# Altium schematic symbol library Capacitor.SchLib: 735 symbols (part 19 of 20)
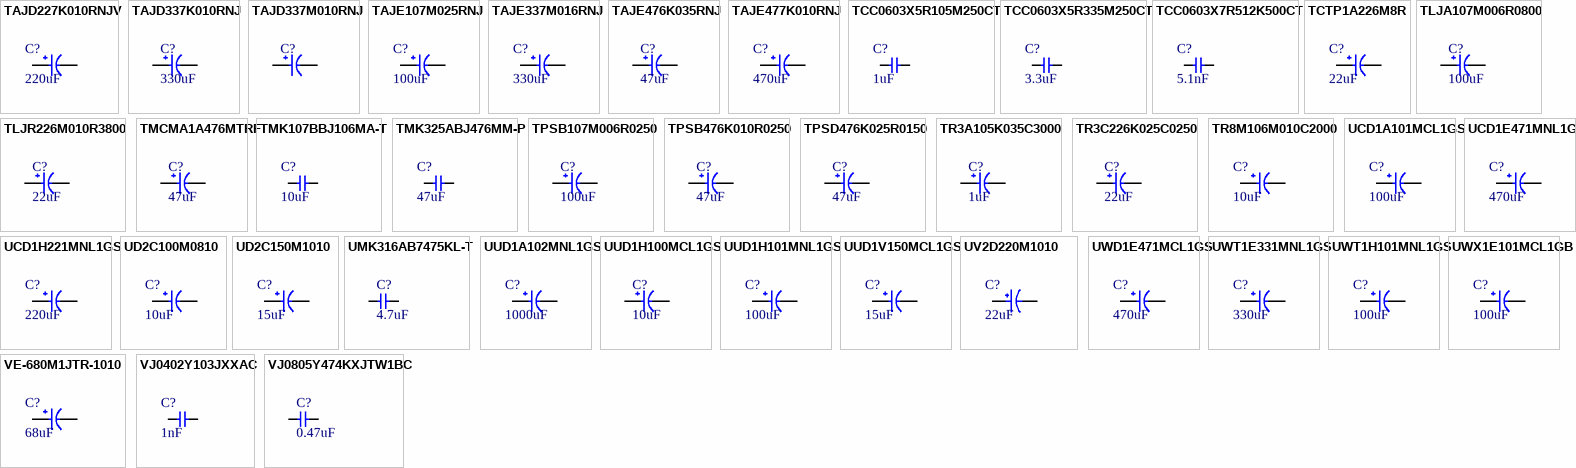
[diagram p36: symbols TAJD227K010RNJV to VJ0805Y474KXJTW1BC]

## TAJD337K010RNJ
designator C?, comment 330uF
CAP TANT 330UF 10% 10V 2917; Manufacturer: Kyocera AVX; Manufacturer Part Number: TAJD337K010RNJ; Item Type: Capacitor; Dielectric Material: 5684ConductorMaterial; Life (Hours): 1000Hour; Ripple Current: 408mA; Supplier: Avnet; LCSC Part Number: C7226; RoHS: Yes; Stock: 24500; Pricing: 500=0.37263 (USD); Voltage Rating (AC): 10V; Lead Free: 5697LeadFree; ComponentLink1URL: https://datasheet.ciiva.com/11794/0900766b802e69d0-11794408.pdf?src-supplier=Rs; ComponentLink1Description: https://datasheet.ciiva.com/11794/0900766b802e69d0-11794408.pdf?src-supplier=Rs; ComponentLink2URL: https://datasheet.ciiva.com/19467/1236841-19467295.pdf?src-supplier=Jameco; ComponentLink2Description: https://datasheet.ciiva.com/19467/1236841-19467295.pdf?src-supplier=Jameco; ComponentLink3URL: https://datasheet.ciiva.com/26944/getdatasheetpartid-149137-26944845.pdf?src-supplier=Verical; ComponentLink3Description: https://datasheet.ciiva.com/26944/getdatasheetpartid-149137-26944845.pdf?src-supplier=Verical; ComponentLink4URL: https://datasheet.ciiva.com/3004/taj-3004541.pdf?src-supplier=Avnet; ComponentLink4Description: https://datasheet.ciiva.com/3004/taj-3004541.pdf?src-supplier=Avnet; ComponentLink5URL: https://datasheet.ciiva.com/3004/taj-3004542.pdf?src-supplier=Avnet; ComponentLink5Description: https://datasheet.ciiva.com/3004/taj-3004542.pdf?src-supplier=Avnet; ComponentLink6URL: https://datasheet.ciiva.com/265/taj-265298.pdf?src-supplier=Digikey; ComponentLink6Description: https://datasheet.ciiva.com/265/taj-265298.pdf?src-supplier=Digikey; ComponentLink7URL: https://datasheet.ciiva.com/265/taj-265299.pdf?src-supplier=Digikey; ComponentLink7Description: https://datasheet.ciiva.com/265/taj-265299.pdf?src-supplier=Digikey; ComponentLink8URL: https://datasheet.ciiva.com/265/taj-265300.pdf?src-supplier=Digikey; ComponentLink8Description: https://datasheet.ciiva.com/265/taj-265300.pdf?src-supplier=Digikey; ComponentLink9URL: https://datasheet.ciiva.com/7832/1680476-7832489.pdf?src-supplier=Element14; ComponentLink9Description: https://datasheet.ciiva.com/7832/1680476-7832489.pdf?src-supplier=Element14; ComponentLink10URL: https://datasheet.ciiva.com/7832/1680476-7832490.pdf?src-supplier=Element14; ComponentLink10Description: https://datasheet.ciiva.com/7832/1680476-7832490.pdf?src-supplier=Element14; ComponentLink11URL: https://datasheet.ciiva.com/7832/1680476-7832491.pdf?src-supplier=Element14; ComponentLink11Description: https://datasheet.ciiva.com/7832/1680476-7832491.pdf?src-supplier=Element14
footprint Case-D
pins: 1, 2

## TAJD337M010RNJ
designator C?
CAP TANT 330UF 20% 10V 2917; Manufacturer: Kyocera AVX; Manufacturer Part Number: TAJD337M010RNJ; Item Type: Capacitor; Supplier: Avnet; LCSC Part Number: C105408; RoHS: Yes; Stock: 500; Pricing: 500=0.71669, 1000=0.70459, 2000=0.6925, 3000=0.6804, 4000=0.6683 (USD); ComponentLink1URL: https://datasheet.ciiva.com/28563/1719052-28563980.pdf?src-supplier=Element14; ComponentLink1Description: https://datasheet.ciiva.com/28563/1719052-28563980.pdf?src-supplier=Element14; ComponentLink2URL: https://datasheet.ciiva.com/22667/1719052-22667623.pdf?src-supplier=Element14; ComponentLink2Description: https://datasheet.ciiva.com/22667/1719052-22667623.pdf?src-supplier=Element14; ComponentLink3URL: https://datasheet.ciiva.com/26822/getdatasheetpartid-86508-26822390.pdf?src-supplier=Verical; ComponentLink3Description: https://datasheet.ciiva.com/26822/getdatasheetpartid-86508-26822390.pdf?src-supplier=Verical; ComponentLink4URL: https://datasheet.ciiva.com/16334/taj-16334699.pdf?src-supplier=Future+Electronics; ComponentLink4Description: https://datasheet.ciiva.com/16334/taj-16334699.pdf?src-supplier=Future+Electronics; ComponentLink5URL: https://datasheet.ciiva.com/265/taj-265249.pdf?src-supplier=Digikey; ComponentLink5Description: https://datasheet.ciiva.com/265/taj-265249.pdf?src-supplier=Digikey; ComponentLink6URL: https://datasheet.ciiva.com/265/taj-265250.pdf?src-supplier=Digikey; ComponentLink6Description: https://datasheet.ciiva.com/265/taj-265250.pdf?src-supplier=Digikey; ComponentLink7URL: https://datasheet.ciiva.com/265/taj-265251.pdf?src-supplier=Digikey; ComponentLink7Description: https://datasheet.ciiva.com/265/taj-265251.pdf?src-supplier=Digikey; ComponentLink8URL: https://datasheet.ciiva.com/11228/taj-11228552.pdf?src-supplier=Avnet; ComponentLink8Description: https://datasheet.ciiva.com/11228/taj-11228552.pdf?src-supplier=Avnet
footprint Case-D
pins: 1, 2

## TAJE107M025RNJ
designator C?, comment 100uF
CAP TANT 100UF 20% 25V 2917; Manufacturer: Kyocera AVX; Manufacturer Part Number: TAJE107M025RNJ; ESR (Equivalent Series Resistance): 300mR; Leakage Current: 25uA; Polarity: Polar; Dissipation Factor: 10%; Supplier 1: Mouser; RoHS: Yes; Category: Tantalum Capacitors; Stock 1: 109; Pricing 1: 1=2.81000, 10=2.81000, 50=2.81000, 100=2.19000, 1000=1.76000, 10000=1.76000 (USD); Mount: Surface Mount; Case/Package: 2917; Number of Pins: 2; Case Code (Imperial): 2917; Case Code (Metric): 7343; Min Operating Temperature: -55°C; Max Operating Temperature: 125°C; Capacitance: 100uF; Tolerance: 20%; Packaging: Tape and Reel; Voltage Rating: 25V; Voltage Rating (DC): 25V; Features: General Purpose; Package Quantity: 1; Termination: SMD/SMT; Series: TAJ; Construction: Flat; Length: 7.3mm; Width: 4.3mm; Height: 4.3mm; Depth: 4.3mm; Height - Seated (Max): 0.169inch; Radiation Hardening: No; Lead Free: Lead Free; RoHS Compliant: Yes; REACH SVHC: No SVHC; ComponentLink1URL: https://datasheet.ciiva.com/26787/taje107m025rnj-26787048.pdf?src-supplier=IIIC; ComponentLink1Description: https://datasheet.ciiva.com/26787/taje107m025rnj-26787048.pdf?src-supplier=IIIC; ComponentLink2URL: https://datasheet.ciiva.com/265/taj-265541.pdf?src-supplier=Digi-Key; ComponentLink2Description: https://datasheet.ciiva.com/265/taj-265541.pdf?src-supplier=Digi-Key; ComponentLink3URL: https://datasheet.ciiva.com/265/taj-265542.pdf?src-supplier=Digi-Key; ComponentLink3Description: https://datasheet.ciiva.com/265/taj-265542.pdf?src-supplier=Digi-Key; ComponentLink4URL: https://datasheet.ciiva.com/265/taj-265540.pdf?src-supplier=Digi-Key; ComponentLink4Description: https://datasheet.ciiva.com/265/taj-265540.pdf?src-supplier=Digi-Key; ComponentLink5URL: https://datasheet.ciiva.com/28609/1719052-28609254.pdf?src-supplier=Element14; ComponentLink5Description: https://datasheet.ciiva.com/28609/1719052-28609254.pdf?src-supplier=Element14; ComponentLink6URL: https://datasheet.ciiva.com/11230/taj-11230456.pdf?src-supplier=Avnet; ComponentLink6Description: https://datasheet.ciiva.com/11230/taj-11230456.pdf?src-supplier=Avnet; ComponentLink7URL: https://datasheet.ciiva.com/17339/taj-17339677.pdf?src-supplier=Avnet+Europe; ComponentLink7Description: https://datasheet.ciiva.com/17339/taj-17339677.pdf?src-supplier=Avnet+Europe; ComponentLink8URL: https://datasheet.ciiva.com/22667/1719052-22667581.pdf?src-supplier=Element14; ComponentLink8Description: https://datasheet.ciiva.com/22667/1719052-22667581.pdf?src-supplier=Element14; Supplier Part Number 1: 581-TAJE107M025RNJ; LCSC Part Number: C7230
footprint Case-E
pins: 1, 2

## TAJE337M016RNJ
designator C?, comment 330uF
CAP TANT 330UF 20% 16V 2917; Manufacturer: Kyocera AVX; Manufacturer Part Number: TAJE337M016RNJ; ESR (Equivalent Series Resistance): 400mR; Leakage Current: 52.8uA; Dissipation Factor: 30%; Item Type: Capacitor; Supplier 1: Arrow Electronics; RoHS: Yes; Category: Tantalum Capacitors; Stock 1: 4000; Pricing 1: 400=1.8678, 2000=1.7998, 4000=1.7657, 6000=1.7481, 10000=1.7306, 30000=1.7133, 50000=1.6961 (USD); Mounting Technology: Surface Mount; Case/Package: 2917; Case Code (Imperial): 2917; Case Code (Metric): 7343; Min Operating Temperature: -55°C; Max Operating Temperature: 125°C; Voltage Rating: 16V; Tolerance: 20%; Packaging: Tape and Reel; Value: 330uF; Termination: SMD/SMT; Voltage Rating (DC): 16V; Series: TAJ; Features: General Purpose; Length: 7.3mm; Width: 4.3mm; Height: 4.3mm; Lead Free: Lead Free; RoHS Compliant: Yes; ComponentLink1URL: https://datasheet.ciiva.com/12882/taj-27497-12882412.pdf?src-supplier=Mouser; ComponentLink1Description: https://datasheet.ciiva.com/12882/taj-27497-12882412.pdf?src-supplier=Mouser; Supplier Part Number 1: TAJE337M016RNJ; LCSC Part Number: C51599
footprint Case-E
pins: 1, 2

## TAJE476K035RNJ
designator C?, comment 47uF
CAP TANT 47UF 10% 35V 2917; Manufacturer: Kyocera AVX; Manufacturer Part Number: TAJE476K035RNJ; Item Type: Capacitors; Dielectric Material: Tantalum; ESR (Equivalent Series Resistance): 900mR; Leakage Current: 16.5uA; Polarity: Polar; Dissipation Factor: 6%; Life (Hours): 2000Hour; Ripple Current: 428mA; Supplier: Digikey; LCSC Part Number: C7233; RoHS: Yes; Stock: 9111; Pricing: 1=3.22, 10=2.115, 50=1.6684, 100=1.5289 (USD); Mounting Technology: Surface Mount,PCB; Case/Package: 2917; Case Code (Metric): 7343; Case Code (Imperial): 2917; Min Operating Temperature: -55°C; Max Operating Temperature: 125°C; Tolerance: 10%; Value: 47uF; Voltage Rating (DC): 35V; Voltage Rating: 35V; Package Quantity: 400; Packaging: Tape and Reel; Termination: SMD/SMT; Voltage: 35V; Features: General Purpose; Series: TAJ; Construction: Flat; Voltage Rating (AC): 35V; Length: 7.3mm; Width: 4.3mm; Height: 4.1mm; Depth: 4.3mm; Radiation Hardening: No; Lead Free: Lead Free; RoHS Compliant: Yes; Reach SVHC Compliant: No; ComponentLink1URL: https://datasheet.ciiva.com/11794/0900766b802e69d0-11794419.pdf?src-supplier=Rs; ComponentLink1Description: https://datasheet.ciiva.com/11794/0900766b802e69d0-11794419.pdf?src-supplier=Rs; ComponentLink2URL: https://datasheet.ciiva.com/18710/taj-eng-18710669.pdf?src-supplier=Distrelec; ComponentLink2Description: https://datasheet.ciiva.com/18710/taj-eng-18710669.pdf?src-supplier=Distrelec; ComponentLink3URL: https://datasheet.ciiva.com/7713/49917-7713350.pdf?src-supplier=Element14; ComponentLink3Description: https://datasheet.ciiva.com/7713/49917-7713350.pdf?src-supplier=Element14; ComponentLink4URL: https://datasheet.ciiva.com/7713/49917-7713351.pdf?src-supplier=Element14; ComponentLink4Description: https://datasheet.ciiva.com/7713/49917-7713351.pdf?src-supplier=Element14; ComponentLink5URL: https://datasheet.ciiva.com/7713/1680476-7713349.pdf?src-supplier=Element14; ComponentLink5Description: https://datasheet.ciiva.com/7713/1680476-7713349.pdf?src-supplier=Element14; ComponentLink6URL: https://datasheet.ciiva.com/265/taj-265571.pdf?src-supplier=Digikey; ComponentLink6Description: https://datasheet.ciiva.com/265/taj-265571.pdf?src-supplier=Digikey; ComponentLink7URL: https://datasheet.ciiva.com/265/taj-265570.pdf?src-supplier=Digikey; ComponentLink7Description: https://datasheet.ciiva.com/265/taj-265570.pdf?src-supplier=Digikey; ComponentLink8URL: https://datasheet.ciiva.com/265/taj-265572.pdf?src-supplier=Digikey; ComponentLink8Description: https://datasheet.ciiva.com/265/taj-265572.pdf?src-supplier=Digikey; ComponentLink9URL: https://datasheet.ciiva.com/12911/taj-27497-12911448.pdf?src-supplier=Mouser; ComponentLink9Description: https://datasheet.ciiva.com/12911/taj-27497-12911448.pdf?src-supplier=Mouser; ComponentLink10URL: https://datasheet.ciiva.com/14603/70001050-14603965.pdf?src-supplier=Allied+Electronics; ComponentLink10Description: https://datasheet.ciiva.com/14603/70001050-14603965.pdf?src-supplier=Allied+Electronics; ComponentLink11URL: https://datasheet.ciiva.com/3004/taj-3004568.pdf?src-supplier=Avnet; ComponentLink11Description: https://datasheet.ciiva.com/3004/taj-3004568.pdf?src-supplier=Avnet; ComponentLink12URL: https://datasheet.ciiva.com/16204/taj-16204972.pdf?src-supplier=Future+Electronics; ComponentLink12Description: https://datasheet.ciiva.com/16204/taj-16204972.pdf?src-supplier=Future+Electronics
footprint Case-E
pins: 1, 2

## TAJE477K010RNJ
designator C?, comment 470uF
CAP TANT 470UF 10% 10V 2917; Manufacturer: Kyocera AVX; Manufacturer Part Number: TAJE477K010RNJ; Dielectric Material: Tantalum; ESR (Equivalent Series Resistance): 500mR; Leakage Current: 47uA; Polarity: Polar; Item Type: Capacitor; Supplier 1: Arrow Electronics; RoHS: Yes; Category: Tantalum Capacitors; Stock 1: 5; Pricing 1: 1=1.3181 (USD); Mounting Technology: Surface Mount,PCB; Case/Package: 2917; Pins: 2; Case Code (Imperial): 2917; Case Code (Metric): 7343; Min Operating Temperature: -55°C; Max Operating Temperature: 125°C; Value: 470uF; Tolerance: 10%; Packaging: Tape and Reel; Voltage Rating: 10V; Voltage Rating (DC): 10V; Package Quantity: 400; Termination: SMD/SMT; Voltage: 10V; Dissipation Factor: 10%; Features: General Purpose; Series: TAJ; Construction: Flat; Length: 7.3mm; Width: 4.3mm; Height: 4.1mm; Depth: 4.3mm; Lead Pitch: 4.4mm; Radiation Hardening: No; Reach SVHC Compliant: No; Lead Free: Lead Free; RoHS Compliant: Yes; ComponentLink1URL: https://datasheet.ciiva.com/7832/taj-7832508.pdf?src-supplier=Element14; ComponentLink1Description: https://datasheet.ciiva.com/7832/taj-7832508.pdf?src-supplier=Element14; ComponentLink2URL: https://datasheet.ciiva.com/7832/taj-7832507.pdf?src-supplier=Element14; ComponentLink2Description: https://datasheet.ciiva.com/7832/taj-7832507.pdf?src-supplier=Element14; ComponentLink3URL: https://datasheet.ciiva.com/265/taj-265547.pdf?src-supplier=Digi-Key; ComponentLink3Description: https://datasheet.ciiva.com/265/taj-265547.pdf?src-supplier=Digi-Key; ComponentLink4URL: https://datasheet.ciiva.com/265/taj-265546.pdf?src-supplier=Digi-Key; ComponentLink4Description: https://datasheet.ciiva.com/265/taj-265546.pdf?src-supplier=Digi-Key; ComponentLink5URL: https://datasheet.ciiva.com/265/taj-265548.pdf?src-supplier=Digi-Key; ComponentLink5Description: https://datasheet.ciiva.com/265/taj-265548.pdf?src-supplier=Digi-Key; ComponentLink6URL: https://datasheet.ciiva.com/12882/taj-27497-12882504.pdf?src-supplier=Mouser; ComponentLink6Description: https://datasheet.ciiva.com/12882/taj-27497-12882504.pdf?src-supplier=Mouser; ComponentLink7URL: https://datasheet.ciiva.com/14602/70001050-14602312.pdf?src-supplier=Allied+Electronics; ComponentLink7Description: https://datasheet.ciiva.com/14602/70001050-14602312.pdf?src-supplier=Allied+Electronics; ComponentLink8URL: https://datasheet.ciiva.com/14600/70001050-14600301.pdf?src-supplier=Allied+Electronics; ComponentLink8Description: https://datasheet.ciiva.com/14600/70001050-14600301.pdf?src-supplier=Allied+Electronics; ComponentLink9URL: https://datasheet.ciiva.com/11229/taj-11229470.pdf?src-supplier=Avnet; ComponentLink9Description: https://datasheet.ciiva.com/11229/taj-11229470.pdf?src-supplier=Avnet; ComponentLink10URL: https://datasheet.ciiva.com/16330/taj-16330918.pdf?src-supplier=Future+Electronics; ComponentLink10Description: https://datasheet.ciiva.com/16330/taj-16330918.pdf?src-supplier=Future+Electronics; Supplier Part Number 1: TAJE477K010RNJ; LCSC Part Number: C7234
footprint Case-E
pins: 1, 2

## TCC0603X5R105M250CT
designator C?, comment 1uF
1uF 25V X5R ±20% 0603 Multilayer Ceramic Capacitors MLCC - SMD/SMT ROHS; Manufacturer: CCTC; Manufacturer Part Number: TCC0603X5R105M250CT; LCSC Part Number: C6266891; Value: 1uF; Item Type: Capacitor; ComponentLink1Description: LCSC; ComponentLink1URL: https://www.lcsc.com/product-detail/Multilayer-Ceramic-Capacitors-MLCC-SMD-SMT_CCTC-TCC0603X5R105M250CT_C6266891.html
footprint Cap-0603
pins: 1, 2

## TCC0603X5R335M250CT
designator C?, comment 3.3uF
25V 3.3uF X5R ±20% 0603 Multilayer Ceramic Capacitors MLCC - SMD/SMT ROHS; Manufacturer: CCTC; Manufacturer Part Number: TCC0603X5R335M250CT; Package: 0603; LCSC Part Number: C5360803; Item Type: Capacitor; ComponentLink1Description: LCSC; ComponentLink1URL: https://www.lcsc.com/product-detail/Multilayer-Ceramic-Capacitors-MLCC-SMD-SMT_CCTC-TCC0603X5R335M250CT_C5360803.html
footprint Cap-0603
pins: 1, 2

## TCC0603X7R512K500CT
designator C?, comment 5.1nF
5.1nF 50V X7R ±10% 0603 Multilayer Ceramic Capacitors MLCC - SMD/SMT ROHS; Manufacturer: CCTC; Manufacturer Part Number: TCC0603X7R512K500CT; Package: 0603; LCSC Part Number: C5360792; Item Type: Capacitor; ComponentLink1Description: LCSC; ComponentLink1URL: https://www.lcsc.com/product-detail/Multilayer-Ceramic-Capacitors-MLCC-SMD-SMT_CCTC-TCC0603X7R512K500CT_C5360792.html
footprint Cap-0603
pins: 1, 2

## TCTP1A226M8R
designator C?, comment 22uF
22uF 10V 5Ω ±20% 0805 Tantalum Capacitors ROHS; Manufacturer: Rohm; Manufacturer Part Number: TCTP1A226M8R; Package: 0805; LCSC Part Number: C2859526; Item Type: Capacitor; ComponentLink1Description: LCSC; ComponentLink1URL: https://www.lcsc.com/product-detail/Tantalum-Capacitors_ROHM-Semicon-TCTP1A226M8R_C2859526.html
footprint Tant-0805
pins: 1, 2

## TLJA107M006R0800
designator C?, comment 100uF
CAP TANT 100UF 20% 6.3V 1206; Manufacturer: Kyocera AVX; Manufacturer Part Number: TLJA107M006R0800; Item Type: Capacitors; Supplier: Arrow Electronics; LCSC Part Number: C27279; RoHS: Yes; Stock: 902000; Pricing: 2000=0.7824, 4000=0.7215, 6000=0.7147, 10000=0.7079, 20000=0.7011, 50000=0.6943 (USD); ComponentLink1URL: https://datasheet.ciiva.com/7720/tlj-7720678.pdf?src-supplier=Element14; ComponentLink1Description: https://datasheet.ciiva.com/7720/tlj-7720678.pdf?src-supplier=Element14; ComponentLink2URL: https://datasheet.ciiva.com/7720/tlj-7720679.pdf?src-supplier=Element14; ComponentLink2Description: https://datasheet.ciiva.com/7720/tlj-7720679.pdf?src-supplier=Element14; ComponentLink3URL: https://datasheet.ciiva.com/6237/tlj-6237900.pdf?src-supplier=Digikey; ComponentLink3Description: https://datasheet.ciiva.com/6237/tlj-6237900.pdf?src-supplier=Digikey; ComponentLink4URL: https://datasheet.ciiva.com/11227/tlj-11227211.pdf?src-supplier=Avnet; ComponentLink4Description: https://datasheet.ciiva.com/11227/tlj-11227211.pdf?src-supplier=Avnet
footprint Case-A
pins: 1, 2

## TLJR226M010R3800
designator C?, comment 22uF
CAP TANT 22UF 20% 10V 0805; Manufacturer: Kyocera AVX; Manufacturer Part Number: TLJR226M010R3800; Item Type: Capacitors; Supplier: Digikey; LCSC Part Number: C1954754; RoHS: Yes; Stock: 3333; Pricing: 1=0.78, 10=0.472, 50=0.3502, 100=0.3122, 500=0.24762, 1000=0.22743 (USD); ComponentLink1URL: https://datasheet.ciiva.com/12884/tlj-35067-12884055.pdf?src-supplier=Mouser; ComponentLink1Description: https://datasheet.ciiva.com/12884/tlj-35067-12884055.pdf?src-supplier=Mouser; ComponentLink2URL: https://datasheet.ciiva.com/7762/1533257-7762814.pdf?src-supplier=Element14; ComponentLink2Description: https://datasheet.ciiva.com/7762/1533257-7762814.pdf?src-supplier=Element14; ComponentLink3URL: https://datasheet.ciiva.com/7762/1533257-7762815.pdf?src-supplier=Element14; ComponentLink3Description: https://datasheet.ciiva.com/7762/1533257-7762815.pdf?src-supplier=Element14; ComponentLink4URL: https://datasheet.ciiva.com/264/tlj-264734.pdf?src-supplier=Digikey; ComponentLink4Description: https://datasheet.ciiva.com/264/tlj-264734.pdf?src-supplier=Digikey; ComponentLink5URL: https://datasheet.ciiva.com/264/tlj-264735.pdf?src-supplier=Digikey; ComponentLink5Description: https://datasheet.ciiva.com/264/tlj-264735.pdf?src-supplier=Digikey; ComponentLink6URL: https://datasheet.ciiva.com/264/tlj-264736.pdf?src-supplier=Digikey; ComponentLink6Description: https://datasheet.ciiva.com/264/tlj-264736.pdf?src-supplier=Digikey; ComponentLink7URL: https://datasheet.ciiva.com/11223/tlj-11223513.pdf?src-supplier=Avnet; ComponentLink7Description: https://datasheet.ciiva.com/11223/tlj-11223513.pdf?src-supplier=Avnet
footprint Tant-0805
pins: 1, 2

## TMCMA1A476MTRF
designator C?, comment 47uF
CAP TANT 47UF 20% 10V 1206; Manufacturer: Vishay Sprague; Manufacturer Part Number: TMCMA1A476MTRF; Item Type: Capacitors; ESR (Equivalent Series Resistance): 2.6R; Leakage Current: 9.4uA; Ripple Current: 173mA; Supplier: Mouser; LCSC Part Number: C4984790; RoHS: Yes; Stock: 7380; Pricing: 1=0.44, 10=0.271, 50=0.271, 100=0.175, 1000=0.146, 10000=0.119 (USD); Mounting Technology: Surface Mount; Case/Package: 1206; Case Code (Metric): 3216; Case Code (Imperial): 1206; Weight: 0.000571oz; Min Operating Temperature: -55°C; Max Operating Temperature: 125°C; Packaging: Tape and Reel; Tolerance: 20%; Termination: SMD/SMT; Package Quantity: 2000; Series: TMCM; Voltage Rating: 10V; Dissipation Factor: 20%; Voltage Rating (DC): 10V; Value: 47uF; Length: 3.2mm; Width: 1.6mm; Height: 1.8mm; RoHS Compliant: Yes; Reach SVHC Compliant: Unknown; ComponentLink1URL: http://www.farnell.com/datasheets/1948250.pdf?src-supplier=Farnell; ComponentLink1Description: http://www.farnell.com/datasheets/1948250.pdf?src-supplier=Farnell; ComponentLink2URL: http://www.mouser.com/ds/2/427/tmcm-515668.pdf?src-supplier=Mouser; ComponentLink2Description: http://www.mouser.com/ds/2/427/tmcm-515668.pdf?src-supplier=Mouser; ComponentLink3URL: http://www.farnell.com/datasheets/2245108.pdf?src-supplier=Farnell; ComponentLink3Description: http://www.farnell.com/datasheets/2245108.pdf?src-supplier=Farnell; ComponentLink4URL: http://www.farnell.com/datasheets/1948250.pdf?src-supplier=Element14; ComponentLink4Description: http://www.farnell.com/datasheets/1948250.pdf?src-supplier=Element14; ComponentLink5URL: http://www.vishay.com/docs/40178/tmcm.pdf?src-supplier=Avnet; ComponentLink5Description: http://www.vishay.com/docs/40178/tmcm.pdf?src-supplier=Avnet
footprint Tant-1206
pins: 1, 2

## TMK107BBJ106MA-T
designator C?, comment 10uF
CAP CER 10UF 25V X5R 0603; Manufacturer: Taiyo Yuden; Manufacturer Part Number: TMK107BBJ106MA-T; Tolerance: 20%; Supplier 1: Digi-Key; Stock 1: 85333; Pricing 1: 1=0.46, 10=0.32, 50=0.2238, 100=0.1918, 500=0.14386, 1000=0.12149 (USD); Mount: Surface Mount; Case/Package: 0603; Case Code (Imperial): 0603; Case Code (Metric): 1608; Min Operating Temperature: -55°C; Max Operating Temperature: 85°C; Packaging: Tape and Reel; Capacitance: 10uF; Voltage Rating: 25V; Lead Free: Lead Free; RoHS Compliant: Yes; ComponentLink1URL: http://ds.yuden.co.jp/TYCOMPAS/ut/detail.do?productNo=TMK107BBJ106MA-T&fileName=TMK107BBJ106MA-T_SS&mode=specSheetDownload&src-supplier=Digi-Key; ComponentLink1Description: http://ds.yuden.co.jp/TYCOMPAS/ut/detail.do?productNo=TMK107BBJ106MA-T&fileName=TMK107BBJ106MA-T_SS&mode=specSheetDownload&src-supplier=Digi-Key; Supplier Part Number 1: 587-6023-1-ND; LCSC Part Number: C386081
footprint CAP-0603
pins: 1, 2

## TMK325ABJ476MM-P
designator C?, comment 47uF
CAP CER 47uF 25V 1210; Manufacturer: Taiyo Yuden; Manufacturer Part Number: TMK325ABJ476MM-P; Dielectric: X5R; Tolerance: 20%; Supplier 1: RSComponents; RoHS: Yes; Category: Ceramic Capacitors; Stock 1: 1000; Pricing 1: 1000=0.37500 (GBP); Mount: Surface Mount; Case/Package: Ceramic; Contact Plating: Tin; Min Operating Temperature: -55°C; Max Operating Temperature: 85°C; Capacitance: 47uF; Termination: Wraparound; Packaging: Tape and Reel; Length: 3.2mm; Lead Free: Lead Free; RoHS Compliant: Yes; ComponentLink1URL: http://www.yuden.co.jp/productdata/catalog/en/mlcc_all_e.pdf?src-supplier=Avnet+Asia; ComponentLink1Description: http://www.yuden.co.jp/productdata/catalog/en/mlcc_all_e.pdf?src-supplier=Avnet+Asia; ComponentLink2URL: http://ds.yuden.co.jp/TYCOMPAS/ut/detail.do?productNo=TMK325ABJ476MM-P&fileName=TMK325ABJ476MM-P_SS&mode=specSheetDownload&src-supplier=Digi-Key; ComponentLink2Description: http://ds.yuden.co.jp/TYCOMPAS/ut/detail.do?productNo=TMK325ABJ476MM-P&fileName=TMK325ABJ476MM-P_SS&mode=specSheetDownload&src-supplier=Digi-Key; ComponentLink3URL: https://ds.yuden.co.jp/TYCOMPAS/ut/detail?pn=TMK325ABJ476MM-P &amp;u=M&src-supplier=Digi-Key; ComponentLink3Description: https://ds.yuden.co.jp/TYCOMPAS/ut/detail?pn=TMK325ABJ476MM-P &amp;u=M&src-supplier=Digi-Key; Supplier Part Number 1: 1782936; LCSC Part Number: C90142
footprint Cap-1210 (SMD 1210)
pins: 1, 2

## TPSB107M006R0250
designator C?, comment 100uF
CAP TANT 100UF 20% 6.3V 1411; Manufacturer: Kyocera AVX; Manufacturer Part Number: TPSB107M006R0250; Item Type: Tantalum Capacitors; Supplier: Digikey; LCSC Part Number: C283239; RoHS: Yes; Stock: 19045; Pricing: 1=0.8, 10=0.504, 50=0.3874, 100=0.3515, 500=0.29072, 1000=0.27195 (USD); ComponentLink1URL: https://datasheet.ciiva.com/16501/tps-16501597.pdf?src-supplier=Future+Electronics; ComponentLink1Description: https://datasheet.ciiva.com/16501/tps-16501597.pdf?src-supplier=Future+Electronics; ComponentLink2URL: https://datasheet.ciiva.com/3004/tps-3004598.pdf?src-supplier=Avnet; ComponentLink2Description: https://datasheet.ciiva.com/3004/tps-3004598.pdf?src-supplier=Avnet; ComponentLink3URL: https://datasheet.ciiva.com/264/tps-264115.pdf?src-supplier=Digikey; ComponentLink3Description: https://datasheet.ciiva.com/264/tps-264115.pdf?src-supplier=Digikey; ComponentLink4URL: https://datasheet.ciiva.com/264/tps-264116.pdf?src-supplier=Digikey; ComponentLink4Description: https://datasheet.ciiva.com/264/tps-264116.pdf?src-supplier=Digikey; ComponentLink5URL: https://datasheet.ciiva.com/264/tps-264117.pdf?src-supplier=Digikey; ComponentLink5Description: https://datasheet.ciiva.com/264/tps-264117.pdf?src-supplier=Digikey
footprint Case-B
pins: 1, 2

## TPSB476K010R0250
designator C?, comment 47uF
CAP TANT 47UF 10% 10V 1411; Manufacturer: Kyocera AVX; Manufacturer Part Number: TPSB476K010R0250; Item Type: Tantalum Capacitors; Life (Hours): 2000Hour; Ripple Current: 583mA; Supplier: Digikey; LCSC Part Number: C308881; RoHS: Yes; Stock: 118032; Pricing: 1=0.78, 10=0.488, 50=0.3748, 100=0.3397, 500=0.28054, 1000=0.26226 (USD); Lead Free: 5697LeadFree; RoHS Compliant: 5897YesNo; ComponentLink1URL: https://datasheet.ciiva.com/16328/tps-16328667.pdf?src-supplier=Future+Electronics; ComponentLink1Description: https://datasheet.ciiva.com/16328/tps-16328667.pdf?src-supplier=Future+Electronics; ComponentLink2URL: https://datasheet.ciiva.com/7713/1680477-7713437.pdf?src-supplier=Element14; ComponentLink2Description: https://datasheet.ciiva.com/7713/1680477-7713437.pdf?src-supplier=Element14; ComponentLink3URL: https://datasheet.ciiva.com/14590/70001047-14590282.pdf?src-supplier=Allied+Electronics; ComponentLink3Description: https://datasheet.ciiva.com/14590/70001047-14590282.pdf?src-supplier=Allied+Electronics; ComponentLink4URL: https://datasheet.ciiva.com/14593/70001047-14593294.pdf?src-supplier=Allied+Electronics; ComponentLink4Description: https://datasheet.ciiva.com/14593/70001047-14593294.pdf?src-supplier=Allied+Electronics; ComponentLink5URL: https://datasheet.ciiva.com/3004/tps-3004609.pdf?src-supplier=Avnet; ComponentLink5Description: https://datasheet.ciiva.com/3004/tps-3004609.pdf?src-supplier=Avnet; ComponentLink6URL: https://datasheet.ciiva.com/264/tps-264094.pdf?src-supplier=Digikey; ComponentLink6Description: https://datasheet.ciiva.com/264/tps-264094.pdf?src-supplier=Digikey; ComponentLink7URL: https://datasheet.ciiva.com/264/tps-264095.pdf?src-supplier=Digikey; ComponentLink7Description: https://datasheet.ciiva.com/264/tps-264095.pdf?src-supplier=Digikey; ComponentLink8URL: https://datasheet.ciiva.com/264/tps-264096.pdf?src-supplier=Digikey; ComponentLink8Description: https://datasheet.ciiva.com/264/tps-264096.pdf?src-supplier=Digikey
footprint Case-B
pins: 1, 2

## TPSD476K025R0150
designator C?, comment 47uF
47uF 25V 150mΩ@100kHz ±10% CASE-D-7343-31(mm) Tantalum Capacitors ROHS; Manufacturer: Kyocera AVX; Manufacturer Part Number: TPSD476K025R0150; Package: CASE-D-7343-31(mm); LCSC Part Number: C284846; Item Type: Capacitor
footprint Case-D
pins: 1, 2

## TR3A105K035C3000
designator C?, comment 1uF
CAP TANT 1UF 10% 35V 1206; Manufacturer: Vishay Sprague; Manufacturer Part Number: TR3A105K035C3000; Item Type: Tantalum Capacitors; Dielectric Material: 5684ConductorMaterial; ESR (Equivalent Series Resistance): 3R; Ripple Current: 160mA; Leakage Current: 500nA; Polarity: Polar; Dissipation Factor: 4%; Power Rating: 500mW; Supplier: Mouser; Supplier Part Number: 74-TR3A105K035C3000; RoHS: Yes; Stock: 3932; Pricing: 1=0.86, 10=0.558, 50=0.558, 100=0.468, 1000=0.35, 10000=0.317 (USD); Mounting Technology: Surface Mount,PCB; Case/Package: 1206; Case Code (Metric): 3216; Case Code (Imperial): 1206; Weight: 566.990462mg; Min Operating Temperature: -55°C; Max Operating Temperature: 125°C; Value: 1uF; Tolerance: 10%; Packaging: Tape and Reel; Voltage Rating: 35V; Termination: SMD/SMT; Voltage: 35V; Features: General Purpose; Series: TANTAMOUNT®, TR3; Construction: Flat; Voltage Rating (DC): 35V; Length: 3.2mm; Width: 1.6mm; Height: 1.6mm; Depth: 1.6mm; Lead Pitch: 2.54mm; Radiation Hardening: No; RoHS Compliant: Yes; Reach SVHC Compliant: Unknown; ComponentLink1URL: https://datasheet.ciiva.com/11793/0900766b80d9a43c-11793571.pdf?src-supplier=Rs; ComponentLink1Description: https://datasheet.ciiva.com/11793/0900766b80d9a43c-11793571.pdf?src-supplier=Rs; ComponentLink2URL: https://datasheet.ciiva.com/22695/1923401-22695196.pdf?src-supplier=Element14; ComponentLink2Description: https://datasheet.ciiva.com/22695/1923401-22695196.pdf?src-supplier=Element14; ComponentLink3URL: https://datasheet.ciiva.com/267/tr3-267812.pdf?src-supplier=Digikey; ComponentLink3Description: https://datasheet.ciiva.com/267/tr3-267812.pdf?src-supplier=Digikey; ComponentLink4URL: https://datasheet.ciiva.com/267/tr3-267811.pdf?src-supplier=Digikey; ComponentLink4Description: https://datasheet.ciiva.com/267/tr3-267811.pdf?src-supplier=Digikey; ComponentLink5URL: https://datasheet.ciiva.com/267/tr3-267813.pdf?src-supplier=Digikey; ComponentLink5Description: https://datasheet.ciiva.com/267/tr3-267813.pdf?src-supplier=Digikey; ComponentLink6URL: https://datasheet.ciiva.com/3004/tr3-3004714.pdf?src-supplier=Avnet; ComponentLink6Description: https://datasheet.ciiva.com/3004/tr3-3004714.pdf?src-supplier=Avnet
footprint Tant-1206
pins: 1, 2

## TR3C226K025C0250
designator C?, comment 22uF
CAP TANT 22UF 10% 25V 2312; Manufacturer: Vishay Sprague; Manufacturer Part Number: TR3C226K025C0250; Item Type: Tantalum Capacitors; Supplier: Mouser; Supplier Part Number: 74-TR3C226K025C0250; RoHS: Yes; Stock: 217; Pricing: 1=1.45, 10=0.99, 50=0.99, 100=0.811, 1000=0.621, 10000=0.597 (USD); ComponentLink1URL: https://datasheet.ciiva.com/12911/tr3-239731-12911111.pdf?src-supplier=Mouser; ComponentLink1Description: https://datasheet.ciiva.com/12911/tr3-239731-12911111.pdf?src-supplier=Mouser; ComponentLink2URL: https://datasheet.ciiva.com/267/tr3-267103.pdf?src-supplier=Digikey; ComponentLink2Description: https://datasheet.ciiva.com/267/tr3-267103.pdf?src-supplier=Digikey; ComponentLink3URL: https://datasheet.ciiva.com/267/tr3-267104.pdf?src-supplier=Digikey; ComponentLink3Description: https://datasheet.ciiva.com/267/tr3-267104.pdf?src-supplier=Digikey; ComponentLink4URL: https://datasheet.ciiva.com/267/tr3-267105.pdf?src-supplier=Digikey; ComponentLink4Description: https://datasheet.ciiva.com/267/tr3-267105.pdf?src-supplier=Digikey; ComponentLink5URL: https://datasheet.ciiva.com/11299/tr3-11299414.pdf?src-supplier=Avnet; ComponentLink5Description: https://datasheet.ciiva.com/11299/tr3-11299414.pdf?src-supplier=Avnet; ComponentLink6URL: https://datasheet.ciiva.com/22731/1923401-22731838.pdf?src-supplier=Element14; ComponentLink6Description: https://datasheet.ciiva.com/22731/1923401-22731838.pdf?src-supplier=Element14; ComponentLink7URL: https://datasheet.ciiva.com/28445/1923401-28445770.pdf?src-supplier=Element14; ComponentLink7Description: https://datasheet.ciiva.com/28445/1923401-28445770.pdf?src-supplier=Element14
footprint Case-C
pins: 1, 2

## TR8M106M010C2000
designator C?, comment 10uF
CAP TANT 10UF 20% 10V 0603; Manufacturer: Vishay Sprague; Manufacturer Part Number: TR8M106M010C2000; Item Type: Capacitor; Supplier: Mouser; Supplier Part Number: 74-TR8M106M010C2000; RoHS: Yes; Category: Tantalum Capacitors; Stock: 25466; Pricing: 1=1.98, 10=1.53, 50=1.41, 100=1.17, 1000=0.818, 10000=0.729 (USD); ComponentLink1URL: https://datasheet.ciiva.com/260/tr8-260762.pdf?src-supplier=Digi-Key; ComponentLink1Description: https://datasheet.ciiva.com/260/tr8-260762.pdf?src-supplier=Digi-Key; ComponentLink2URL: https://datasheet.ciiva.com/260/tr8-260763.pdf?src-supplier=Digi-Key; ComponentLink2Description: https://datasheet.ciiva.com/260/tr8-260763.pdf?src-supplier=Digi-Key; ComponentLink3URL: https://datasheet.ciiva.com/260/tr8-260764.pdf?src-supplier=Digi-Key; ComponentLink3Description: https://datasheet.ciiva.com/260/tr8-260764.pdf?src-supplier=Digi-Key; ComponentLink4URL: https://datasheet.ciiva.com/18442/70230632-18442380.pdf?src-supplier=Allied+Electronics; ComponentLink4Description: https://datasheet.ciiva.com/18442/70230632-18442380.pdf?src-supplier=Allied+Electronics; ComponentLink5URL: https://datasheet.ciiva.com/11281/tr8-11281914.pdf?src-supplier=Avnet; ComponentLink5Description: https://datasheet.ciiva.com/11281/tr8-11281914.pdf?src-supplier=Avnet; Package: 0603; LCSC Part Number: C1952781; ComponentLink6Description: LCSC; ComponentLink6URL: https://www.lcsc.com/product-detail/Tantalum-Capacitors_Vishay-Intertech-TR8M106M010C2000_C1952781.html
footprint Tant-0603
pins: 1, 2

## UCD1A101MCL1GS
designator C?, comment 100uF
CAP ALUM 100UF 20% 10V SMD; Manufacturer: Nichicon; Manufacturer Part Number: UCD1A101MCL1GS; Ripple Current: 240mA; Impedance: 360mR; Leakage Current: 10uA; Polarity: Polar; Dissipation Factor: 0.19%; Life (Hours): 2000Hour; Item Type: Capacitor; Supplier 1: Digi-Key; RoHS: Yes; Category: Aluminum Electrolytic Capacitors; Stock 1: 6029; Pricing 1: 1=0.51000, 10=0.35900, 50=0.27160, 100=0.23660, 500=0.17526 (USD); Mount: Surface Mount; Case/Package: Radial; Min Operating Temperature: -55°C; Max Operating Temperature: 105°C; Capacitance: 100uF; Packaging: Tape and Reel; Package Quantity: 1000; Voltage Rating: 10V; Voltage Rating (DC): 10V; Tolerance: 20%; Termination: SMD/SMT; Voltage: 10V; Series: CD; Construction: Cylindrical; Diameter: 6.3mm; Length: 5.8mm; Height: 5.8mm; Height - Seated (Max): 0.24inch; Radiation Hardening: No; RoHS Compliant: Yes; ComponentLink1URL: https://datasheet.ciiva.com/11776/0900766b80ebdadd-11776792.pdf?src-supplier=RSComponents; ComponentLink1Description: https://datasheet.ciiva.com/11776/0900766b80ebdadd-11776792.pdf?src-supplier=RSComponents; ComponentLink2URL: https://datasheet.ciiva.com/111/e-cd-111628.pdf?src-supplier=Digi-Key; ComponentLink2Description: https://datasheet.ciiva.com/111/e-cd-111628.pdf?src-supplier=Digi-Key; ComponentLink3URL: https://datasheet.ciiva.com/11686/e-cd-11686168.pdf?src-supplier=Avnet; ComponentLink3Description: https://datasheet.ciiva.com/11686/e-cd-11686168.pdf?src-supplier=Avnet; Supplier Part Number 1: 493-14563-1-ND; LCSC Part Number: C340720
footprint UCD1A101MCL1GS
pins: 1, 2

## UCD1E471MNL1GS
designator C?, comment 470uF
CAP ALUM 470UF 20% 25V SMD; Manufacturer: Nichicon; Manufacturer Part Number: UCD1E471MNL1GS; Ripple Current: 850mA; Impedance: 80mR; Leakage Current: 3uA; Life (Hours): 5000Hour; Dissipation Factor: 0.14%; Supplier 1: Digi-Key; Stock 1: 0; Pricing 1: 1=0.96, 10=0.708, 50=0.566, 100=0.4852 (USD); Mount: Surface Mount,PCB; Case/Package: Radial; Min Operating Temperature: -55°C; Max Operating Temperature: 105°C; Capacitance: 470uF; Tolerance: 20%; Package Quantity: 1; Packaging: Tape and Reel; Voltage Rating: 25V; Voltage Rating (DC): 25V; Termination: SMD/SMT; Voltage: 25V; Features: General Purpose; Series: CD; Construction: Cylindrical; Diameter: 10mm; Length: 10mm; Height: 10mm; Height - Seated (Max): 0.394inch; Radiation Hardening: No; RoHS Compliant: Yes; ComponentLink1URL: http://nichicon-us.com/english/products/pdfs/e-ucd.pdf?src-supplier=Digi-Key; ComponentLink1Description: http://nichicon-us.com/english/products/pdfs/e-ucd.pdf?src-supplier=Digi-Key; ComponentLink2URL: http://www.mouser.com/ds/2/293/e-cd-22158.pdf?src-supplier=Mouser; ComponentLink2Description: http://www.mouser.com/ds/2/293/e-cd-22158.pdf?src-supplier=Mouser; ComponentLink3URL: http://uk.rs-online.com/webdocs/0ebd/0900766b80ebdadd.pdf?src-supplier=RSComponents; ComponentLink3Description: http://uk.rs-online.com/webdocs/0ebd/0900766b80ebdadd.pdf?src-supplier=RSComponents; ComponentLink4URL: http://www.nichicon.co.jp/english/products/pdfs/e-cd.pdf?src-supplier=Avnet; ComponentLink4Description: http://www.nichicon.co.jp/english/products/pdfs/e-cd.pdf?src-supplier=Avnet; ComponentLink5URL: http://products.nichicon.co.jp/en/pdf/XJA043/e-cd.pdf?src-supplier=Future+Electronics; ComponentLink5Description: http://products.nichicon.co.jp/en/pdf/XJA043/e-cd.pdf?src-supplier=Future+Electronics; ComponentLink6URL: https://www.verical.com/server-webapp/html/getDatasheet?partID=512790&src-supplier=Verical; ComponentLink6Description: https://www.verical.com/server-webapp/html/getDatasheet?partID=512790&src-supplier=Verical; ComponentLink7URL: http://www.nichicon.co.jp/english/products/pdfs/e-cd.pdf?src-supplier=Avnet+Europe; ComponentLink7Description: http://www.nichicon.co.jp/english/products/pdfs/e-cd.pdf?src-supplier=Avnet+Europe; Supplier Part Number 1: 493-6386-1-ND; LCSC Part Number: C2690145
footprint UCD1E471MNL1GS_
pins: 1, 2

## UCD1H221MNL1GS
designator C?, comment 220uF
CAP ALUM 220UF 20% 50V SMD; Manufacturer: Nichicon; Manufacturer Part Number: UCD1H221MNL1GS; Ripple Current: 700mA; Impedance: 160mR; Leakage Current: 3uA; Life (Hours): 5000Hour; Dissipation Factor: 0.1%; Item Type: Capacitor; Supplier 1: Digi-Key; RoHS: Yes; Category: Aluminum Electrolytic Capacitors; Pricing 1: 1=0.85000, 10=0.60200, 50=0.45480, 100=0.39620 (USD); Mount: Surface Mount,PCB; Case/Package: Radial; Min Operating Temperature: -55°C; Max Operating Temperature: 105°C; Capacitance: 220uF; Tolerance: 20%; Voltage Rating: 50V; Packaging: Tape and Reel; Package Quantity: 1; Voltage Rating (DC): 50V; Termination: SMD/SMT; Voltage: 50V; Features: General Purpose; Series: CD; Construction: Cylindrical; Diameter: 10mm; Length: 10mm; Height: 10mm; Height - Seated (Max): 0.394inch; Radiation Hardening: No; Lead Free: Lead Free; RoHS Compliant: Yes; ComponentLink1URL: https://datasheet.ciiva.com/11776/0900766b80ebdadd-11776792.pdf?src-supplier=RSComponents; ComponentLink1Description: https://datasheet.ciiva.com/11776/0900766b80ebdadd-11776792.pdf?src-supplier=RSComponents; ComponentLink2URL: https://datasheet.ciiva.com/5362/e-cd-22158-5362489.pdf?src-supplier=Mouser; ComponentLink2Description: https://datasheet.ciiva.com/5362/e-cd-22158-5362489.pdf?src-supplier=Mouser; ComponentLink3URL: https://datasheet.ciiva.com/11684/e-cd-11684678.pdf?src-supplier=Avnet; ComponentLink3Description: https://datasheet.ciiva.com/11684/e-cd-11684678.pdf?src-supplier=Avnet; ComponentLink4URL: https://datasheet.ciiva.com/15037/e-cd-15037119.pdf?src-supplier=Digi-Key; ComponentLink4Description: https://datasheet.ciiva.com/15037/e-cd-15037119.pdf?src-supplier=Digi-Key; ComponentLink5URL: https://datasheet.ciiva.com/16393/e-cd-16393493.pdf?src-supplier=Future+Electronics; ComponentLink5Description: https://datasheet.ciiva.com/16393/e-cd-16393493.pdf?src-supplier=Future+Electronics; ComponentLink6URL: https://datasheet.ciiva.com/17354/e-cd-17354606.pdf?src-supplier=Avnet+Europe; ComponentLink6Description: https://datasheet.ciiva.com/17354/e-cd-17354606.pdf?src-supplier=Avnet+Europe; Supplier Part Number 1: 493-6390-1-ND; LCSC Part Number: C116211
footprint UCD-220uF-10mmDia (0.406" L x 0.406" W (10.30mm x 10.30mm))
pins: 1, 2

## UD2C100M0810
designator C?, comment 10uF
10uF 160V ±20% SMD,D8xL10.2mm Aluminum Electrolytic Capacitors - SMD ROHS; Manufacturer: Honor Elec; Manufacturer Part Number: UD2C100M0810; Package: SMD,D8xL10.2mm; LCSC Part Number: C88696; Item Type: Capacitor; ComponentLink1Description: LCSC; ComponentLink1URL: https://www.lcsc.com/product-detail/Aluminum-Electrolytic-Capacitors-SMD_Honor-Elec-UD2C100M0810_C88696.html
footprint UD2C100M0810
pins: 1, 2

## UD2C150M1010
designator C?, comment 15uF
15uF 160V ±20% SMD,D10xL10.2mm Aluminum Electrolytic Capacitors - SMD ROHS; Manufacturer: Honor Elec; Manufacturer Part Number: UD2C150M1010; Package: SMD,D10xL10.2mm; LCSC Part Number: C98557; Item Type: Capacitor; ComponentLink1Description: LCSC; ComponentLink1URL: https://www.lcsc.com/product-detail/Aluminum-Electrolytic-Capacitors-SMD_Honor-Elec-UD2C150M1010_C98557.html
footprint UD2C150M1010
pins: 1, 2

## UMK316AB7475KL-T
designator C?, comment 4.7uF
CAP CER 4.7UF 50V X7R 1206; Manufacturer: Taiyo Yuden; Manufacturer Part Number: UMK316AB7475KL-T; Item Type: Capacitor; Tolerance: 10%; Supplier: Digikey; LCSC Part Number: C92853; RoHS: Yes; Stock: 392550; Pricing: 1=0.3, 10=0.198, 50=0.146, 100=0.1189, 500=0.09386, 1000=0.07925 (USD); Mounting Technology: Surface Mount; Case/Package: 1206; Pins: 2; Case Code (Metric): 3216; Case Code (Imperial): 1206; Min Operating Temperature: -55°C; Max Operating Temperature: 125°C; Value: 4.7uF; Voltage Rating: 50V; Packaging: Tape and Reel; Package Quantity: 2000; Voltage Rating (DC): 50V; Dielectric: X7R; Termination: SMD/SMT; Series: M; Construction: Flat; Length: 3.2mm; Width: 1.6mm; Height: 1.6mm; Depth: 1.6mm; Radiation Hardening: No; RoHS Compliant: Yes; Reach SVHC Compliant: Unknown; ComponentLink1URL: https://datasheet.ciiva.com/170/umk316ab7475kl-t-ss-170928.pdf?src-supplier=Digikey; ComponentLink1Description: https://datasheet.ciiva.com/170/umk316ab7475kl-t-ss-170928.pdf?src-supplier=Digikey; ComponentLink2URL: https://datasheet.ciiva.com/2990/umk316ab7475kl-t-ss-2990070.pdf?src-supplier=Avnet; ComponentLink2Description: https://datasheet.ciiva.com/2990/umk316ab7475kl-t-ss-2990070.pdf?src-supplier=Avnet; ComponentLink3URL: https://datasheet.ciiva.com/15922/1010umk316ab7475kl-t-15922628.pdf?src-supplier=Onlinecomponents.com; ComponentLink3Description: https://datasheet.ciiva.com/15922/1010umk316ab7475kl-t-15922628.pdf?src-supplier=Onlinecomponents.com; ComponentLink4URL: https://datasheet.ciiva.com/7975/1481447-7975911.pdf?src-supplier=Element14; ComponentLink4Description: https://datasheet.ciiva.com/7975/1481447-7975911.pdf?src-supplier=Element14; ComponentLink5URL: https://datasheet.ciiva.com/5413/mlcc-all-e-541559-5413006.pdf?src-supplier=Mouser; ComponentLink5Description: https://datasheet.ciiva.com/5413/mlcc-all-e-541559-5413006.pdf?src-supplier=Mouser
footprint Cap-1206 (SMD 1206)
pins: 1, 2

## UUD1A102MNL1GS
designator C?, comment 1000uF
CAP ALUM 1000UF 20% 10V SMD; Manufacturer: Nichicon; Manufacturer Part Number: UUD1A102MNL1GS; Dielectric Material: Aluminium; Ripple Current: 670mA; Impedance: 90mR; Value: 1mF; Leakage Current: 3uA; Life (Hours): 5000Hour; Dissipation Factor: 0.24%; Lead Diameter: 1.1mm; Item Type: Capacitor; Supplier 1: Arrow Electronics; RoHS: Yes; Category: Aluminum Electrolytic Capacitors; Stock 1: 26500; Pricing 1: 500=0.33690, 1000=0.29090, 2500=0.27810, 5000=0.26240, 12500=0.24280, 25000=0.24040 (USD); Case/Package: Radial; Pins: 2; Min Operating Temperature: -55°C; Max Operating Temperature: 105°C; Tolerance: 20%; Package Quantity: 1; Voltage Rating (DC): 10V; Ripple Current (AC): 670mA; Packaging: Tape and Reel; Voltage Rating: 10V; Termination: SMD/SMT; Voltage: 10V; Series: UD; Construction: Cylindrical; Diameter: 10mm; Length: 10mm; Height: 10mm; Lead Pitch: 4.5mm; Height - Seated (Max): 0.394inch; Radiation Hardening: No; Reach SVHC Compliant: Yes; Lead Free: Lead Free; RoHS Compliant: Yes; ComponentLink1URL: https://datasheet.ciiva.com/98/e-ud-98263.pdf?src-supplier=Digi-Key; ComponentLink1Description: https://datasheet.ciiva.com/98/e-ud-98263.pdf?src-supplier=Digi-Key; ComponentLink2URL: https://datasheet.ciiva.com/16502/e-ud-16502759.pdf?src-supplier=Future+Electronics; ComponentLink2Description: https://datasheet.ciiva.com/16502/e-ud-16502759.pdf?src-supplier=Future+Electronics; ComponentLink3URL: https://datasheet.ciiva.com/98/e-ud-98264.pdf?src-supplier=Digi-Key; ComponentLink3Description: https://datasheet.ciiva.com/98/e-ud-98264.pdf?src-supplier=Digi-Key; ComponentLink4URL: https://datasheet.ciiva.com/28458/e-ud-28458024.pdf?src-supplier=Element14; ComponentLink4Description: https://datasheet.ciiva.com/28458/e-ud-28458024.pdf?src-supplier=Element14; ComponentLink5URL: https://datasheet.ciiva.com/98/e-ud-98265.pdf?src-supplier=Digi-Key; ComponentLink5Description: https://datasheet.ciiva.com/98/e-ud-98265.pdf?src-supplier=Digi-Key; ComponentLink6URL: https://datasheet.ciiva.com/7793/66055-7793131.pdf?src-supplier=Element14; ComponentLink6Description: https://datasheet.ciiva.com/7793/66055-7793131.pdf?src-supplier=Element14; ComponentLink7URL: https://datasheet.ciiva.com/22693/66055-22693549.pdf?src-supplier=Element14; ComponentLink7Description: https://datasheet.ciiva.com/22693/66055-22693549.pdf?src-supplier=Element14; Supplier Part Number 1: UUD1A102MNL1GS; LCSC Part Number: C445277
footprint UUD1A102MNL1GS
pins: 1, 2

## UUD1H100MCL1GS
designator C?, comment 10uF
CAP ALUM 10UF 20% 50V SMD; Manufacturer: Nichicon; Manufacturer Part Number: UUD1H100MCL1GS; Item Type: Capacitors; Dielectric Material: 158ConductorMaterial; Polarity: 5066Direction; Supplier: Arrow Electronics; LCSC Part Number: C308830; RoHS: Yes; Stock: 12000; Pricing: 5000=0.0889 (USD); Voltage Rating (AC): 50V; Lead Free: 5697LeadFree; ComponentLink1URL: https://datasheet.ciiva.com/30522/getdatasheetpartid-388123-30522069.pdf?src-supplier=Verical; ComponentLink1Description: https://datasheet.ciiva.com/30522/getdatasheetpartid-388123-30522069.pdf?src-supplier=Verical; ComponentLink2URL: https://datasheet.ciiva.com/11776/0900766b80fa39e7-11776898.pdf?src-supplier=Rs; ComponentLink2Description: https://datasheet.ciiva.com/11776/0900766b80fa39e7-11776898.pdf?src-supplier=Rs; ComponentLink3URL: https://datasheet.ciiva.com/16291/e-ud-16291224.pdf?src-supplier=Future+Electronics; ComponentLink3Description: https://datasheet.ciiva.com/16291/e-ud-16291224.pdf?src-supplier=Future+Electronics; ComponentLink4URL: https://datasheet.ciiva.com/28640/e-ud-28640439.pdf?src-supplier=Element14; ComponentLink4Description: https://datasheet.ciiva.com/28640/e-ud-28640439.pdf?src-supplier=Element14; ComponentLink5URL: https://datasheet.ciiva.com/5361/e-ud-5361338.pdf?src-supplier=Mouser; ComponentLink5Description: https://datasheet.ciiva.com/5361/e-ud-5361338.pdf?src-supplier=Mouser; ComponentLink6URL: https://datasheet.ciiva.com/96/e-ud-96792.pdf?src-supplier=Digikey; ComponentLink6Description: https://datasheet.ciiva.com/96/e-ud-96792.pdf?src-supplier=Digikey; ComponentLink7URL: https://datasheet.ciiva.com/96/e-ud-96793.pdf?src-supplier=Digikey; ComponentLink7Description: https://datasheet.ciiva.com/96/e-ud-96793.pdf?src-supplier=Digikey; ComponentLink8URL: https://datasheet.ciiva.com/96/e-ud-96794.pdf?src-supplier=Digikey; ComponentLink8Description: https://datasheet.ciiva.com/96/e-ud-96794.pdf?src-supplier=Digikey; ComponentLink9URL: https://datasheet.ciiva.com/11686/e-ud-11686668.pdf?src-supplier=Avnet; ComponentLink9Description: https://datasheet.ciiva.com/11686/e-ud-11686668.pdf?src-supplier=Avnet; ComponentLink10URL: https://datasheet.ciiva.com/7781/66055-7781449.pdf?src-supplier=Element14; ComponentLink10Description: https://datasheet.ciiva.com/7781/66055-7781449.pdf?src-supplier=Element14
footprint UUD1H100MCL1GS
pins: 1, 2